# Altium footprint library custom-case.PcbLib: 483 footprints (part 7 of 31)
Each footprint in its own frame and in the unit in brackets; x right, y up, seen from the top. Pads: shape width x height; smd on the part's side, far side on the other; paste and mask are expansions set on the pad; w line width, h text height; cw(c..) or ccw(c..) is an arc to the next point about the centre after c.
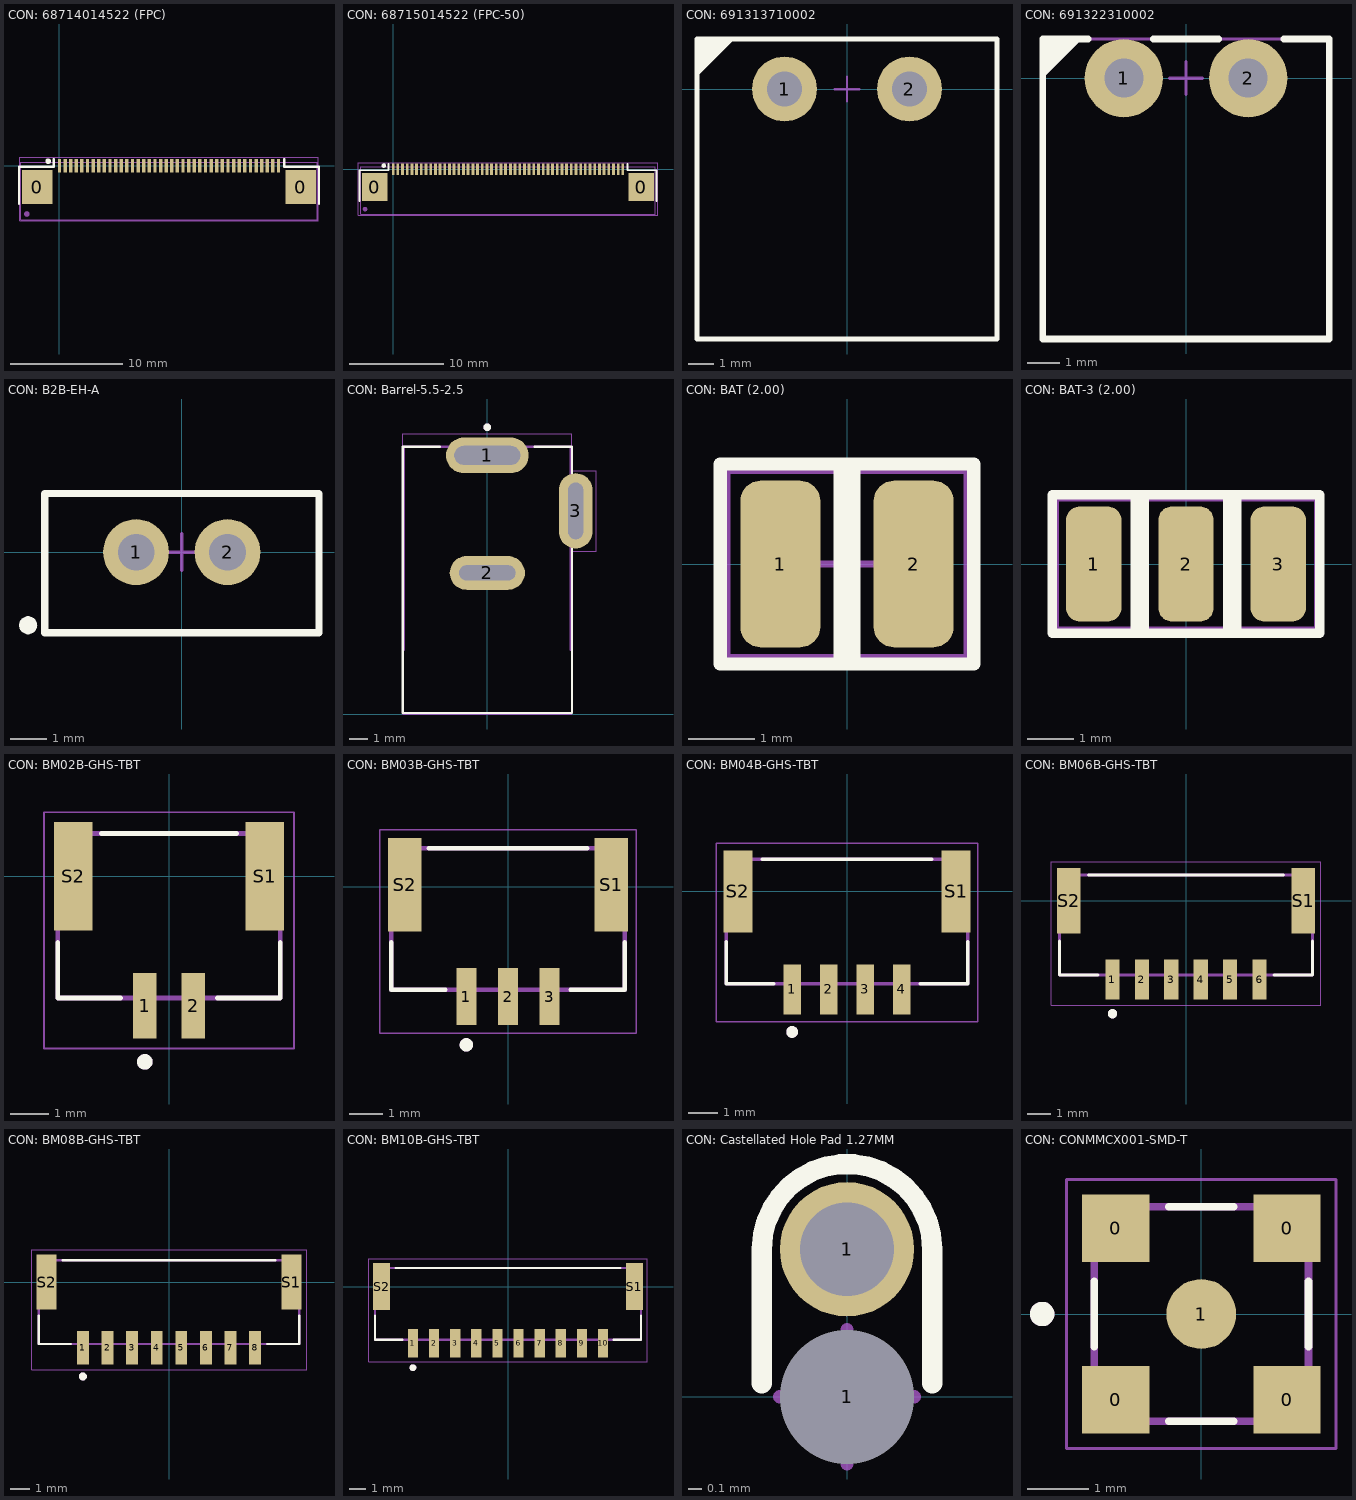
[diagram p6: the footprints below, top view; thin cyan lines are the x and y axes]

## CON: 68714014522 (FPC) [mm]
pads (44):
  rect 2.7x3 smd: 0(-1.975,-1.9) 0(21.475,-1.9)
  rect 0.3x1.2 smd: 1(0,0) 2(0.5,0) 3(1,0) 4(1.5,0) 5(2,0) 6(2.5,0) 7(3,0) 8(3.5,0) 9(4,0) 10(4.5,0) 11(5,0) 12(5.5,0) 13(6,0) 14(6.5,0) 15(7,0) 16(7.5,0) 17(8,0) 18(8.5,0) 19(9,0) 20(9.5,0) 21(10,0) 22(10.5,0) 23(11,0) 24(11.5,0) 25(12,0) 26(12.5,0) 27(13,0) 28(13.5,0) 29(14,0) 30(14.5,0) 31(15,0) 32(15.5,0) 33(16,0) 34(16.5,0) 35(17,0) 36(17.5,0) 37(18,0) 38(18.5,0) 39(19,0) 40(19.5,0)
  round 0.5 on Mech1: ""(-2.9,-4.3)
  round 0.5 on Top Overlay: ""(-1,0.4)
Top Overlay:
  lines w0.2: -3.6,-3.4 -3.6,-0.1 -0.5,-0.1 -0.5,0.6 ; 20,0.6 20,-0.1 23.1,-0.1 23.1,-3.4
Top Assy:
  lines w0.1: -3.45,-4.8 22.95,-4.8 22.95,0.3 -3.45,0.3 -3.45,-4.8
Size Area:
  lines w0.1: -3.55,-4.9 23.05,-4.9 23.05,0.75 -3.55,0.75 -3.55,-4.9
3D body "68714014522 (rev1).stp": height 2.1, standoff 0, extent -3.45,-4.8 22.95,0.3

## CON: 68715014522 (FPC-50) [mm]
pads (54):
  rect 2.7x3 smd: 0(-1.975,-1.9) 0(26.475,-1.9)
  rect 0.3x1.2 smd: 1(0,0) 2(0.5,0) 3(1,0) 4(1.5,0) 5(2,0) 6(2.5,0) 7(3,0) 8(3.5,0) 9(4,0) 10(4.5,0) 11(5,0) 12(5.5,0) 13(6,0) 14(6.5,0) 15(7,0) 16(7.5,0) 17(8,0) 18(8.5,0) 19(9,0) 20(9.5,0) 21(10,0) 22(10.5,0) 23(11,0) 24(11.5,0) 25(12,0) 26(12.5,0) 27(13,0) 28(13.5,0) 29(14,0) 30(14.5,0) 31(15,0) 32(15.5,0) 33(16,0) 34(16.5,0) 35(17,0) 36(17.5,0) 37(18,0) 38(18.5,0) 39(19,0) 40(19.5,0) 41(20,0) 42(20.5,0) 43(21,0) 44(21.5,0) 45(22,0) 46(22.5,0) 47(23,0) 48(23.5,0) 49(24,0) 50(24.5,0)
  round 0.5 on Mech1: ""(-3,-4.25)
  round 0.5 on Top Overlay: ""(-1,0.4)
Top Overlay:
  lines w0.2: -3.6,-3.4 -3.6,-0.1 -0.5,-0.1 -0.5,0.6 ; 25,0.6 25,-0.1 28.1,-0.1 28.1,-3.4
Top Assy:
  lines w0.1: -3.45,-4.8 -3.45,0.3 27.95,0.3 27.95,-4.8 -3.45,-4.8
Size Area:
  lines w0.1: -3.75,-4.9 28.25,-4.9 28.25,0.7 -3.75,0.7 -3.75,-4.9
3D body "68715014522 (rev1).stp": height 2.1, standoff 0, extent -3.45,-4.8 27.95,0.3

## CON: 691313710002 [mm]
pads (2):
  round 2.6 hole 1.4 mask+0.075: 1(-2.5,0) 2(2.5,0)
Top Overlay:
  region: -6,0.5 -4.5,2 -6,2
  lines w0.2: -6,-10 -6,2 6,2 6,-10 -6,-10
Top Assy:
  lines w0.1: -6,-10 -6,2 6,2 6,-10 -6,-10
Size Area:
  lines w0.1: -0.5,0 0.5,0 ; 0,-0.5 0,0.5 ; -6,-10 -6,2 6,2 6,-10 -6,-10
3D body "691313710002 (rev1).stp": height 9.25, standoff -2.75, extent -6,-10 6,2

## CON: 691322310002 [mm]
pads (2):
  round 2.4 hole 1.2 mask+0.075: 1(-1.905,0) 2(1.905,0)
Top Overlay:
  region: -4.4,0 -3.2,1.2 -4.4,1.2
  lines w0.2: -3,1.2 -4.4,1.2 -4.4,-8 4.4,-8 4.4,1.2 3,1.2 ; -1,1.2 1,1.2
Top Assy:
  lines w0.1: -4.4,-8 4.4,-8 4.4,1.2 -4.4,1.2 -4.4,-8
Size Area:
  lines w0.1: -0.5,0 0.5,0 ; 0,-0.5 0,0.5 ; -4.4,-8 -4.4,1.2 4.4,1.2 4.4,-8 -4.4,-8
3D body "691322310002 (rev1).stp": height 7.7, standoff -3, extent -4.405,-8 4.405,1.2

## CON: B2B-EH-A [mm]
pads (3):
  round 1.8 hole 1: 1(-1.25,0) 2(1.25,0)
  round 0.5 on Top Overlay: ""(-4.2,-2)
Top Overlay:
  lines w0.2: -3.75,-2.2 3.75,-2.2 3.75,1.6 -3.75,1.6 -3.75,-2.2
Top Assy:
  lines w0.1: -3.75,-2.2 3.75,-2.2 3.75,1.6 -3.75,1.6 -3.75,-2.2
Size Area:
  lines w0.1: -0.5,0 0.5,0 ; 0,-0.5 0,0.5 ; -3.75,-2.2 3.75,-2.2 3.75,1.6 -3.75,1.6 -3.75,-2.2
3D body "User Library-B2B-EH-A.STEP": height 6.05, standoff -3.15, extent -3.75,-2.2 3.75,1.6

## CON: Barrel-5.5-2.5 [mm] "Power Barrel Connector"
pads (3):
  oval 4.4x1.9 hole 1 slot 3.5 at 0 deg: 1(0,13.75)
  oval 4x1.8 hole 0.8 slot 3 at 0 deg: 2(0,7.5)
  oval 1.8x4 hole 0.8 slot 3 at 90 deg: 3(4.7,10.8)
Top Overlay:
  circle w0.2: c0,15.245 r0.1
  lines w0.127: -2.52,14.2 -4.5,14.2 -4.5,0.055 0,0.055 4.5,0.055 4.5,14.2 2.52,14.2
3D model:
  circle w0.2: c0,15.245 r0.1
  lines w0.127: -4.445,3.405 -4.445,14.2 4.445,14.2 4.445,3.405 ; -4.445,0.055 4.445,0.055 -4.445,0.055
Size Area:
  lines w0.05: -4.5,0 4.5,0 4.5,8.645 5.8,8.645 5.8,12.945 4.5,12.945 4.5,14.9 -4.5,14.9 -4.5,0
3D body "CON-SOCJ-2155--3DModel-STEP-56544.STEP": height 11.1, standoff -4.3, extent -4.5,0.05 4.75,14.15

## CON: BAT (2.00) [mm]
height 10
pads (2):
  rrect50% 1.2x2.5 smd: 1(-1,0) 2(1,0)
Top Overlay:
  lines w0.2: -1.9,-1.5 1.9,-1.5 1.9,1.5 -1.9,1.5 -1.9,-1.5
  lines w0.4: 0,-1.4 0,1.4
Top Assy:
  lines w0.1: -1.8,-1.4 -1.8,1.4 1.8,1.4 1.8,-1.4 -1.8,-1.4
Size Area:
  lines w0.05: -1.8,-1.4 -1.8,1.4 1.8,1.4 1.8,-1.4 -1.8,-1.4
  lines w0.1: -0.5,0 0.5,0 ; 0,-0.5 0,0.5

## CON: BAT-3 (2.00) [mm]
height 10
pads (3):
  rrect50% 1.2x2.5 smd: 1(-2,0) 2(0,0) 3(2,0)
Top Overlay:
  lines w0.2: -2.9,-1.5 2.9,-1.5 2.9,1.5 -2.9,1.5 -2.9,-1.5
  lines w0.4: -1,-1.4 -1,1.4 ; 1,-1.4 1,1.4
Top Assy:
  lines w0.1: -2.8,-1.4 -2.8,1.4 2.9,1.4 2.9,-1.4 -2.8,-1.4
Size Area:
  lines w0.05: -2.8,-1.4 -2.8,1.4 2.8,1.4 2.8,-1.4 -2.8,-1.4
  lines w0.1: -0.5,0 0.5,0 ; 0,-0.5 0,0.5

## CON: BM02B-GHS-TBT [mm]
pads (4):
  rect 0.6x1.7 smd: 1(-0.625,-3.35) 2(0.625,-3.35)
  rect 1x2.8 smd: S1(2.475,0) S2(-2.475,0)
Top Overlay:
  circle w0.2: c-0.625,-4.8 r0.1
  lines w0.127: -2.875,-1.72 -2.875,-3.15 -1.25,-3.15 ; -1.75,1.1 1.75,1.1 ; 1.25,-3.15 2.875,-3.15 2.875,-1.72
3D model:
  circle w0.2: c-0.625,-4.8 r0.1
  lines w0.127: -2.875,-3.15 2.875,-3.15 2.875,1.1 -2.875,1.1 -2.875,-3.15
Size Area:
  lines w0.05: -3.225,-4.45 3.225,-4.45 3.225,1.65 -3.225,1.65 -3.225,-4.45
3D body "BM02B-GHS-TBT.STEP": height 4.21, standoff 0.01, extent -2.875,-3.825 2.875,1.125

## CON: BM03B-GHS-TBT [mm]
pads (5):
  rect 0.6x1.7 smd: 1(-1.25,-3.3) 2(0,-3.3) 3(1.25,-3.3)
  rect 1x2.8 smd: S1(3.1,0.05) S2(-3.1,0.05)
Top Overlay:
  circle w0.2: c-1.25,-4.75 r0.1
  lines w0.127: -3.5,-1.67 -3.5,-3.1 -1.875,-3.1 ; -2.375,1.15 2.375,1.15 ; 1.875,-3.1 3.5,-3.1 3.5,-1.67
3D model:
  circle w0.2: c-1.25,-4.75 r0.1
  lines w0.127: -3.5,-3.1 -3.5,1.15 3.5,1.15 3.5,-3.1 -3.5,-3.1
Size Area:
  lines w0.05: -3.85,-4.4 -3.85,1.7 3.85,1.7 3.85,-4.4 -3.85,-4.4
3D body "BM03B-GHS-TBT.STEP": height 4.05, standoff -0.15, extent -3.5,-3.8 3.5,1.15

## CON: BM04B-GHS-TBT [mm]
pads (6):
  rect 0.6x1.7 smd: 1(-1.875,-3.35) 2(-0.625,-3.35) 3(0.625,-3.35) 4(1.875,-3.35)
  rect 1x2.8 smd: S1(3.725,0) S2(-3.725,0)
Top Overlay:
  circle w0.2: c-1.875,-4.8 r0.1
  lines w0.127: -4.125,-1.72 -4.125,-3.15 -2.5,-3.15 ; -2.9,1.1 2.9,1.1 ; 2.5,-3.15 4.125,-3.15 4.125,-1.72
3D model:
  circle w0.2: c-1.875,-4.8 r0.1
  lines w0.127: -4.125,-3.15 4.125,-3.15 4.125,1.1 -4.125,1.1 -4.125,-3.15
Size Area:
  lines w0.05: -4.475,-4.45 4.475,-4.45 4.475,1.65 -4.475,1.65 -4.475,-4.45
3D body "BM04B-GHS-TBT.STEP": height 4.15, standoff 0, extent -4.125,-3.825 4.125,1.125

## CON: BM06B-GHS-TBT [mm]
pads (8):
  rect 0.6x1.7 smd: 1(-3.125,-3.35) 2(-1.875,-3.35) 3(-0.625,-3.35) 4(0.625,-3.35) 5(1.875,-3.35) 6(3.125,-3.35)
  rect 1x2.8 smd: S1(4.975,0) S2(-4.975,0)
Top Overlay:
  circle w0.2: c-3.125,-4.8 r0.1
  lines w0.127: -5.375,-1.72 -5.375,-3.15 -3.75,-3.15 ; -4.15,1.1 4.15,1.1 ; 3.75,-3.15 5.375,-3.15 5.375,-1.72
3D model:
  circle w0.2: c-3.125,-4.8 r0.1
  lines w0.127: -5.375,-3.15 5.375,-3.15 5.375,1.1 -5.375,1.1 -5.375,-3.15
Size Area:
  lines w0.05: -5.725,-4.45 5.725,-4.45 5.725,1.65 -5.725,1.65 -5.725,-4.45
3D body "BM06B-GHS-TBT.STEP": height 4.15, standoff 0, extent -5.375,-3.825 5.375,1.125

## CON: BM08B-GHS-TBT [mm]
pads (10):
  rect 0.6x1.7 smd: 1(-4.375,-3.35) 2(-3.125,-3.35) 3(-1.875,-3.35) 4(-0.625,-3.35) 5(0.625,-3.35) 6(1.875,-3.35) 7(3.125,-3.35) 8(4.375,-3.35)
  rect 1x2.8 smd: S1(6.225,0) S2(-6.225,0)
Top Overlay:
  circle w0.2: c-4.375,-4.8 r0.1
  lines w0.127: -6.625,-1.72 -6.625,-3.15 -5,-3.15 ; -5.4,1.1 0,1.1 5.4,1.1 ; 5,-3.15 6.625,-3.15 6.625,-1.72
3D model:
  circle w0.2: c-4.375,-4.8 r0.1
  lines w0.127: -6.625,-3.15 6.625,-3.15 6.625,1.1 -6.625,1.1 -6.625,-3.15
Size Area:
  lines w0.05: -6.975,-4.45 7,-4.45 7,1.65 -6.975,1.65 -6.975,-4.45
3D body "BM08B-GHS-TBT.STEP": height 4.15, standoff 0, extent -6.625,-3.85 6.625,1.1

## CON: BM10B-GHS-TBT [mm]
pads (12):
  rect 0.6x1.7 smd: 1(-5.625,-3.35) 2(-4.375,-3.35) 3(-3.125,-3.35) 4(-1.875,-3.35) 5(-0.625,-3.35) 6(0.625,-3.35) 7(1.875,-3.35) 8(3.125,-3.35) 9(4.375,-3.35) 10(5.625,-3.35)
  rect 1x2.8 smd: S1(7.475,0) S2(-7.475,0)
Top Overlay:
  circle w0.2: c-5.625,-4.8 r0.1
  lines w0.127: -7.875,-1.72 -7.875,-3.15 -6.25,-3.15 ; -6.65,1.1 0,1.1 6.65,1.1 ; 6.25,-3.15 7.875,-3.15 7.875,-1.72
3D model:
  circle w0.2: c-5.625,-4.8 r0.1
  lines w0.127: -7.875,-3.15 -7.875,1.1 7.875,1.1 7.875,-3.15 -7.875,-3.15
Size Area:
  lines w0.05: -8.225,-4.45 -8.225,1.65 8.225,1.65 8.225,-4.45 -8.225,-4.45
3D body "BM10B-GHS-TBT.STEP": height 4.2, standoff 0, extent -7.875,-3.825 7.875,1.125

## CON: Castellated Hole Pad 1.27MM [mm]
pads (2):
  round 0.7 hole 1 mask+0.075: 1(0,0)
  round 1 hole 0.7 mask+0.075: 1(0,1.1)
Top Overlay:
  lines w0.15: -0.635,0.1 -0.635,1.1 cw(c0,1.1) 0.635,1.1 0.635,0.1
Size Area:
  lines w0.1: -0.5,0 0.5,0 ; 0,-0.5 0,0.5
Multi-Layer:
  region: -0.5,0 0.5,0 0.5,1.1 -0.5,1.1

## CON: CONMMCX001-SMD-T [mm]
height 10
pads (5):
  rect 1.1x1.1 smd: 0(-1.4,-1.4) 0(-1.4,1.4) 0(1.4,-1.4) 0(1.4,1.4)
  round 1.14 smd: 1(0,0)
Top Overlay:
  circle w0.2: c-2.6,0 r0.1
  lines w0.127: -1.75,-0.53 -1.75,0.53 ; -0.53,-1.75 0.53,-1.75 ; -0.53,1.75 0.53,1.75 ; 1.75,-0.53 1.75,0.53
3D model:
  circle w0.2: c-2.6,0 r0.1
  lines w0.127: -1.75,-1.75 1.75,-1.75 1.75,1.75 -1.75,1.75 -1.75,-1.75
Size Area:
  lines w0.05: -2.2,-2.2 2.2,-2.2 2.2,2.2 -2.2,2.2 -2.2,-2.2
3D body "step_temp.STEP": height 5.2, standoff 0, extent -1.75,-1.75 1.75,1.75